# Altium footprint library IoT_SYNTHPATCH.PcbLib: 65 footprints (part 2 of 5)
Each footprint in its own frame and in the unit in brackets; x right, y up, seen from the top. Pads: shape width x height; smd on the part's side, far side on the other; paste and mask are expansions set on the pad; w line width, h text height; cw(c..) or ccw(c..) is an arc to the next point about the centre after c.
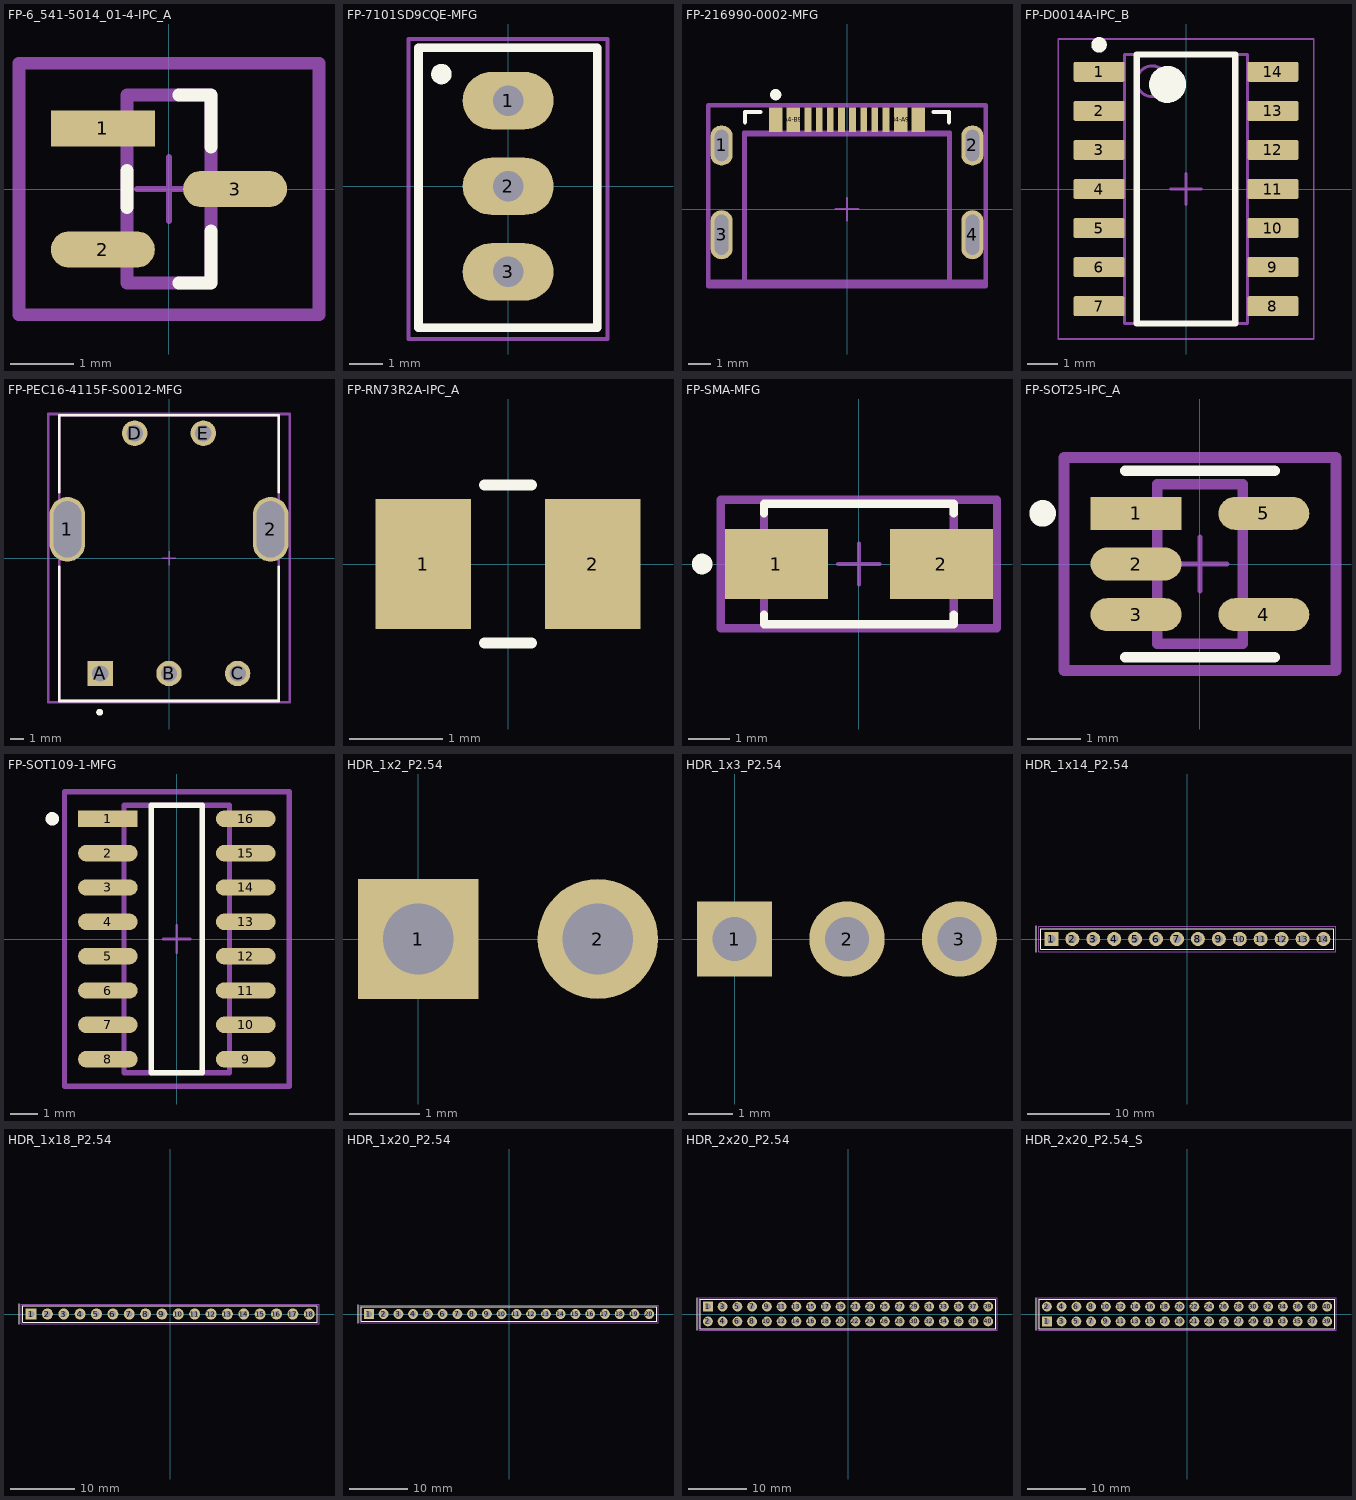
[diagram p1: the footprints below, top view; thin cyan lines are the x and y axes]

## FP-6_541-5014_01-4-IPC_A [mm]
pads (3):
  rect 1.633x0.572 smd paste+0 mask+0: 1(-1.038,0.95)
  rrect100% 1.633x0.572 smd paste+0 mask+0: 2(-1.038,-0.95) 3(1.038,0)
Top Overlay:
  lines w0.2: -0.657,-0.289 -0.657,0.289 ; 0.153,-1.475 0.657,-1.475 0.657,-0.661 ; 0.153,1.475 0.657,1.475 0.657,0.661
Top 3D Body:
  lines w0.2: -0.657,-1.475 -0.657,1.475 0.657,1.475 0.657,-1.475 -0.657,-1.475
Top Courtyard:
  lines w0.2: -2.355,-1.975 -2.355,1.975 2.355,1.975 2.355,-1.975 -2.355,-1.975
Top Assembly:
  lines w0.2: -2.355,-1.975 -2.355,1.975 2.355,1.975 2.355,-1.975 -2.355,-1.975
  text ".Designator" at 0,-0.001 h1
Top Component Center:
  lines w0.1: -0.5,0 0.5,0 ; 0,-0.5 0,0.5
3D body "Diode_Vishay_BAT54S-E3-08_eec.STEP": height 0.25, standoff 0, extent -2.355,-1.975 2.355,1.975

## FP-7101SD9CQE-MFG [mm]
pads (3):
  oval 2.7x1.7 hole 0.9 square: 1(0,2.54) 2(0,0) 3(0,-2.54)
Top Overlay:
  circle w0.254: c-1.981,3.327 r0.178
  region: -1.956,3.073 -1.726,3.315 -2.002,3.577 -2.231,3.334
  lines w0.254: -2.658,-4.191 -2.658,4.109 2.642,4.109 2.642,-4.191 -2.658,-4.191
Top Courtyard:
  lines w0.127: -2.954,-4.531 -2.954,4.369 2.946,4.369 2.946,-4.531 -2.954,-4.531
Top Assembly:
  lines w0.254: -2.658,-4.191 -2.658,4.109 2.642,4.109 2.642,-4.191 -2.658,-4.191

## FP-216990-0002-MFG [mm]
pads (16):
  rrect100% 1x1.8 hole 1.4 slot 0.6 at 0 deg paste-2539.97 mask+0: 1(-5.62,2.85) 2(5.62,2.85)
  rrect100% 1x2.2 hole 1.8 slot 0.6 at 0 deg paste-2539.97 mask+0: 3(-5.62,-1.15) 4(5.62,-1.15)
  rect 0.6x1.1 smd paste+0 mask+0: A1-B12(-3.2,4) A4-B9(-2.4,4) B1-A12(3.2,4) B4-A9(2.4,4)
  rect 0.3x1.1 smd paste+0 mask+0: A5(-1.25,4) A6(-0.25,4) A7(0.25,4) A8(1.25,4) B5(1.75,4) B6(0.75,4) B7(-0.75,4) B8(-1.75,4)
Top Overlay:
  circle w0.25: c-3.195,5.125 r0.125
  lines w0.2: -4.57,3.9 -4.57,4.35 -3.875,4.35 ; 3.875,4.35 4.57,4.35 4.57,3.9
Top 3D Body:
  lines w0.2: -6.22,-3.25 6.22,-3.25 ; -4.57,-3.35 -4.57,3.35 4.57,3.35 4.57,-3.35 -4.57,-3.35
Top Courtyard:
  lines w0.2: -6.22,-3.45 -6.22,4.65 6.22,4.65 6.22,-3.45 -6.22,-3.45
Board:
  lines w0.15: -4.62,-3.25 -4.62,3.45 4.62,3.45 4.62,-3.25
Top Assembly:
  lines w0.2: -6.22,-3.45 -6.22,4.65 6.22,4.65 6.22,-3.45 -6.22,-3.45
  text ".Designator" at 0,0.787 h1
Top Component Center:
  lines w0.1: -0.5,0 0.5,0 ; 0,-0.5 0,0.5
3D body "Conn_Molex_216990-0002_eec.STEP": height 0.25, standoff 0, extent -6.22,-3.45 6.22,4.65

## FP-D0014A-IPC_B [mm] "SOIC, 14-Leads, Body 8.75x4mm, Pitch 1.27mm, IPC Low Density"
height 1.75
pads (14):
  rrect15% 1.65x0.65 smd: 1(-2.825,3.81) 2(-2.825,2.54) 3(-2.825,1.27) 4(-2.825,0) 5(-2.825,-1.27) 6(-2.825,-2.54) 7(-2.825,-3.81) 8(2.825,-3.81) 9(2.825,-2.54) 10(2.825,-1.27) 11(2.825,0) 12(2.825,1.27) 13(2.825,2.54) 14(2.825,3.81)
Top Overlay:
  circle w0.6: c-0.6,3.4 r0.3
  circle w0.25: c-2.825,4.685 r0.125
  lines w0.2: -1.6,-4.375 1.6,-4.375 1.6,4.375 -1.6,4.375 -1.6,-4.375
Mechanical 1:
  text ".Designator" at -1.575,-0.325 h0.8
Mechanical 13:
  circle w0.1: c-1.1,3.5 r0.5
  lines w0.1: -2,-4.375 2,-4.375 2,4.375 -2,4.375 -2,-4.375
Mechanical 15:
  lines w0.05: -4.15,-4.875 4.15,-4.875 4.15,4.875 -4.15,4.875 -4.15,-4.875
  lines w0.1: -0.5,0 0.5,0 ; 0,-0.5 0,0.5
3D body "SOIC-14akaD0014AakaM14A.stp": height 1.59, standoff -0.01, extent -3.023,-4.318 3.022,4.318

## FP-PEC16-4115F-S0012-MFG [mm]
pads (7):
  rrect100% 2.6x4.7 hole 4.1 slot 2 at 0 deg paste-2539.97 mask+0: 1(-7.4,2.1) 2(7.4,2.1)
  rect 1.85x1.85 hole 1.2 paste-2539.97 mask+0: A(-5,-8.4)
  round 1.85 hole 1.2 paste-2539.97 mask+0: B(0,-8.4) C(5,-8.4) D(-2.5,9.1) E(2.5,9.1)
Top Overlay:
  circle w0.25: c-5.05,-11.225 r0.125
  lines w0.2: -8,-0.625 -8,-10.4 8,-10.4 8,-0.625 ; -8,4.825 -8,10.4 8,10.4 8,4.825
Top 3D Body:
  lines w0.2: -8,-10.4 -8,10.4 8,10.4 8,-10.4 -8,-10.4
Top Courtyard:
  lines w0.2: -8.8,-10.5 -8.8,10.5 8.8,10.5 8.8,-10.5 -8.8,-10.5
Top Assembly:
  lines w0.2: -8.8,-10.5 -8.8,10.5 8.8,10.5 8.8,-10.5 -8.8,-10.5
  text ".Designator" at 0,0.187 h1
Top Component Center:
  lines w0.1: -0.5,0 0.5,0 ; 0,-0.5 0,0.5
3D body "Enc_Bourns_Inc_PEC16-4115F-S0012_eec.STEP": height 0.25, standoff 0, extent -8.8,-10.5 8.8,10.5

## FP-RN73R2A-IPC_A [mm] "0805 (2012 metric)"
pads (2):
  rect 1.025x1.4 smd paste+0 mask+0: 1(-0.913,0) 2(0.913,0)
Top Overlay:
  lines w0.12: -0.25,-0.85 0.25,-0.85 ; -0.25,0.85 0.25,0.85

## FP-SMA-MFG [mm]
pads (2):
  rect 2.5x1.7 smd paste+0 mask+0: 1(-2,0) 2(2,0)
Top Overlay:
  circle w0.25: c-3.8,0 r0.125
  lines w0.2: -2.3,-1.225 -2.3,-1.46 2.3,-1.46 2.3,-1.225 ; -2.3,1.225 -2.3,1.46 2.3,1.46 2.3,1.225
Top 3D Body:
  lines w0.2: -2.3,-1.46 2.3,-1.46 2.3,1.46 -2.3,1.46 -2.3,-1.46
Top Courtyard:
  lines w0.2: -3.35,-1.56 3.35,-1.56 3.35,1.56 -3.35,1.56 -3.35,-1.56
Top Assembly:
  lines w0.2: -3.35,-1.56 3.35,-1.56 3.35,1.56 -3.35,1.56 -3.35,-1.56
  text ".Designator" at 0,0.187 h1
Top Component Center:
  lines w0.1: -0.5,0 0.5,0 ; 0,-0.5 0,0.5
3D body "Diode_Diodes_Inc_SBRT5A50SA-13_eec.STEP": height 0.25, standoff 0, extent -3.35,-1.56 3.35,1.56

## FP-SOT25-IPC_A [mm]
pads (5):
  rect 1.707x0.616 smd paste+0 mask+0: 1(-1.201,0.95)
  rrect100% 1.707x0.616 smd paste+0 mask+0: 2(-1.201,0) 3(-1.201,-0.95) 4(1.201,-0.95) 5(1.201,0.95)
Top Overlay:
  circle w0.25: c-2.954,0.95 r0.125
  lines w0.2: -1.4,-1.75 1.4,-1.75 ; -1.4,1.75 1.4,1.75
Top 3D Body:
  lines w0.2: -0.8,-1.5 0.8,-1.5 0.8,1.5 -0.8,1.5 -0.8,-1.5
Top Courtyard:
  lines w0.2: -2.554,-2 2.554,-2 2.554,2 -2.554,2 -2.554,-2
Top Assembly:
  lines w0.2: -2.554,-2 2.554,-2 2.554,2 -2.554,2 -2.554,-2
  text ".Designator" at 0,-0.001 h1
Top Component Center:
  lines w0.1: -0.5,0 0.5,0 ; 0,-0.5 0,0.5
3D body "IC_Diodes_Inc_AP2127K-3_3TRG1_eec.STEP": height 0.25, standoff 0, extent -2.554,-2 2.554,2

## FP-SOT109-1-MFG [mm]
pads (16):
  rect 2.204x0.608 smd paste+0 mask+0: 1(-2.551,4.445)
  rrect100% 2.204x0.608 smd paste+0 mask+0: 2(-2.551,3.175) 3(-2.551,1.905) 4(-2.551,0.635) 5(-2.551,-0.635) 6(-2.551,-1.905) 7(-2.551,-3.175) 8(-2.551,-4.445) 9(2.551,-4.445) 10(2.551,-3.175) 11(2.551,-1.905) 12(2.551,-0.635) 13(2.551,0.635) 14(2.551,1.905) 15(2.551,3.175) 16(2.551,4.445)
Top Overlay:
  circle w0.25: c-4.603,4.445 r0.125
  lines w0.2: -0.949,-4.95 0.949,-4.95 0.949,4.95 -0.949,4.95 -0.949,-4.95
Top 3D Body:
  lines w0.2: -1.95,-4.95 1.95,-4.95 1.95,4.95 -1.95,4.95 -1.95,-4.95
Top Courtyard:
  lines w0.2: -4.153,-5.45 4.153,-5.45 4.153,5.45 -4.153,5.45 -4.153,-5.45
Top Assembly:
  lines w0.2: -4.153,-5.45 4.153,-5.45 4.153,5.45 -4.153,5.45 -4.153,-5.45
  text ".Designator" at 0,0.187 h1
Top Component Center:
  lines w0.1: -0.5,0 0.5,0 ; 0,-0.5 0,0.5
3D body "IC_Nexperia_74HC165D_653_eec.STEP": height 0.25, standoff 0, extent -4.153,-5.45 4.153,5.45

## HDR_1x2_P2.54 [mm] "Pin header 1x2, 2.54 mm"
pads (2):
  rect 1.7x1.7 hole 1: 1(0,0)
  round 1.7 hole 1: 2(2.54,0)

## HDR_1x3_P2.54 [mm] "Pin header 1x3, 2.54 mm"
pads (3):
  rect 1.7x1.7 hole 1: 1(0,0)
  round 1.7 hole 1: 2(2.54,0) 3(5.08,0)

## HDR_1x14_P2.54 [mm] "Single-row header 1x14, 2.54 mm pitch (board-to-board)"
height 8.5
pads (14):
  rect 1.7x1.7 hole 1: 1(-16.51,0.013)
  round 1.7 hole 1: 2(-13.97,0.013) 3(-11.43,0.013) 4(-8.89,0.013) 5(-6.35,0.013) 6(-3.81,0.013) 7(-1.27,0.013) 8(1.27,0.013) 9(3.81,0.013) 10(6.35,0.013) 11(8.89,0.013) 12(11.43,0.013) 13(13.97,0.013) 14(16.51,0.013)
Top Overlay:
  lines w0.15: -18.38,-1.587 -18.38,1.613 ; -17.78,-1.257 -17.78,1.283 17.78,1.283 17.78,-1.257 -17.78,-1.257
Mechanical 15:
  lines w0.05: -18.03,-1.507 -18.03,1.533 18.03,1.533 18.03,-1.507 -18.03,-1.507

## HDR_1x18_P2.54 [mm] "Single-row header 1x18, 2.54 mm pitch (board-to-board)"
height 8.5
pads (18):
  rect 1.7x1.7 hole 1: 1(-21.59,0.013)
  round 1.7 hole 1: 2(-19.05,0.013) 3(-16.51,0.013) 4(-13.97,0.013) 5(-11.43,0.013) 6(-8.89,0.013) 7(-6.35,0.013) 8(-3.81,0.013) 9(-1.27,0.013) 10(1.27,0.013) 11(3.81,0.013) 12(6.35,0.013) 13(8.89,0.013) 14(11.43,0.013) 15(13.97,0.013) 16(16.51,0.013) 17(19.05,0.013) 18(21.59,0.013)
Top Overlay:
  lines w0.15: -23.46,-1.587 -23.46,1.613 ; -22.86,-1.257 -22.86,1.283 22.86,1.283 22.86,-1.257 -22.86,-1.257
Mechanical 15:
  lines w0.05: -23.11,-1.507 -23.11,1.533 23.11,1.533 23.11,-1.507 -23.11,-1.507

## HDR_1x20_P2.54 [mm] "Single-row header 1x20, 2.54 mm pitch (board-to-board)"
height 8.5
pads (20):
  rect 1.7x1.7 hole 1: 1(-24.13,0.013)
  round 1.7 hole 1: 2(-21.59,0.013) 3(-19.05,0.013) 4(-16.51,0.013) 5(-13.97,0.013) 6(-11.43,0.013) 7(-8.89,0.013) 8(-6.35,0.013) 9(-3.81,0.013) 10(-1.27,0.013) 11(1.27,0.013) 12(3.81,0.013) 13(6.35,0.013) 14(8.89,0.013) 15(11.43,0.013) 16(13.97,0.013) 17(16.51,0.013) 18(19.05,0.013) 19(21.59,0.013) 20(24.13,0.013)
Top Overlay:
  lines w0.15: -26,-1.587 -26,1.613 ; -25.4,-1.257 -25.4,1.283 25.4,1.283 25.4,-1.257 -25.4,-1.257
Mechanical 15:
  lines w0.05: -25.65,-1.507 -25.65,1.533 25.65,1.533 25.65,-1.507 -25.65,-1.507

## HDR_2x20_P2.54 [mm] "Pin header 2x20, 2.54 mm (analog board, top)"
height 8.5
pads (40):
  rect 1.7x1.7 hole 1: 1(-24.13,1.27)
  round 1.7 hole 1: 2(-24.13,-1.27) 3(-21.59,1.27) 4(-21.59,-1.27) 5(-19.05,1.27) 6(-19.05,-1.27) 7(-16.51,1.27) 8(-16.51,-1.27) 9(-13.97,1.27) 10(-13.97,-1.27) 11(-11.43,1.27) 12(-11.43,-1.27) 13(-8.89,1.27) 14(-8.89,-1.27) 15(-6.35,1.27) 16(-6.35,-1.27) 17(-3.81,1.27) 18(-3.81,-1.27) 19(-1.27,1.27) 20(-1.27,-1.27) 21(1.27,1.27) 22(1.27,-1.27) 23(3.81,1.27) 24(3.81,-1.27) 25(6.35,1.27) 26(6.35,-1.27) 27(8.89,1.27) 28(8.89,-1.27) 29(11.43,1.27) 30(11.43,-1.27) 31(13.97,1.27) 32(13.97,-1.27) 33(16.51,1.27) 34(16.51,-1.27) 35(19.05,1.27) 36(19.05,-1.27) 37(21.59,1.27) 38(21.59,-1.27) 39(24.13,1.27) 40(24.13,-1.27)
Top Overlay:
  lines w0.15: -26,-2.8 -26,2.8 ; -25.4,-2.54 25.4,-2.54 25.4,2.54 -25.4,2.54 -25.4,-2.54
Mechanical 15:
  lines w0.05: -25.65,-2.79 25.65,-2.79 25.65,2.79 -25.65,2.79 -25.65,-2.79

## HDR_2x20_P2.54_S [mm] "Socket 2x20, 2.54 mm, 8.5 mm (main board, bottom; rows swapped)"
height 8.5
pads (40):
  rect 1.7x1.7 hole 1: 1(-24.13,-1.27)
  round 1.7 hole 1: 2(-24.13,1.27) 3(-21.59,-1.27) 4(-21.59,1.27) 5(-19.05,-1.27) 6(-19.05,1.27) 7(-16.51,-1.27) 8(-16.51,1.27) 9(-13.97,-1.27) 10(-13.97,1.27) 11(-11.43,-1.27) 12(-11.43,1.27) 13(-8.89,-1.27) 14(-8.89,1.27) 15(-6.35,-1.27) 16(-6.35,1.27) 17(-3.81,-1.27) 18(-3.81,1.27) 19(-1.27,-1.27) 20(-1.27,1.27) 21(1.27,-1.27) 22(1.27,1.27) 23(3.81,-1.27) 24(3.81,1.27) 25(6.35,-1.27) 26(6.35,1.27) 27(8.89,-1.27) 28(8.89,1.27) 29(11.43,-1.27) 30(11.43,1.27) 31(13.97,-1.27) 32(13.97,1.27) 33(16.51,-1.27) 34(16.51,1.27) 35(19.05,-1.27) 36(19.05,1.27) 37(21.59,-1.27) 38(21.59,1.27) 39(24.13,-1.27) 40(24.13,1.27)
Top Overlay:
  lines w0.15: -26,-2.8 -26,2.8 ; -25.4,-2.54 -25.4,2.54 25.4,2.54 25.4,-2.54 -25.4,-2.54
Mechanical 15:
  lines w0.05: -25.65,-2.79 -25.65,2.79 25.65,2.79 25.65,-2.79 -25.65,-2.79